# Altium schematic symbol library BeadFilter.SchLib: 54 symbols (part 3 of 3)
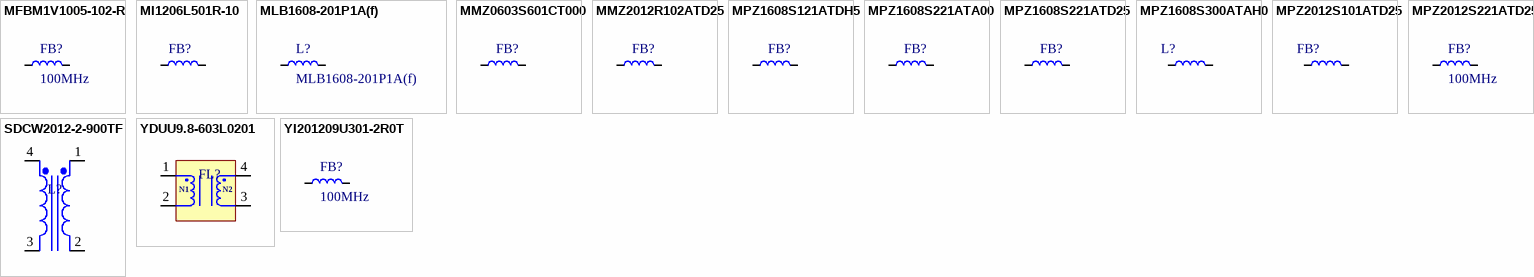
[diagram p3: symbols MFBM1V1005-102-R to YI201209U301-2R0T]

## MPZ1608S121ATDH5
designator FB?
FERRITE BEAD 120 OHM 0603 1LN; Manufacturer: TDK; Manufacturer Part Number: MPZ1608S121ATDH5; Number of Lines: 1; Max Current Rating: 2A; DC Resistance (DCR): 45mR; Impedance: 120R; Tolerance: 25%; Test Frequency: 100MHz; Supplier 1: Digi-Key; RoHS: Yes; Category: Ferrite Beads and Chips; Pricing 1: 1=0.11000, 10=0.08600, 25=0.07720, 50=0.05660, 100=0.04890, 250=0.03860, 500=0.03260, 1000=0.02746 (USD); Mount: Surface Mount; Case/Package: 0603; Case Code (Metric): 1608; Case Code (Imperial): 0603; Weight: 7.1E-05oz; Min Operating Temperature: -55°C; Max Operating Temperature: 125°C; Package Quantity: 4000; Packaging: Tape and Reel; Termination: SMD/SMT; Max DC Current: 2A; Length: 0.063inch; Width: 0.031inch; Height: 0.03inch; Ratings: AEC-Q200; RoHS Compliant: Yes; ComponentLink1URL: https://media.digikey.com/pdf/Data%20Sheets/TDK%20PDFs/MPZ_Series_Br.pdf?src-supplier=Digi-Key; ComponentLink1Description: https://media.digikey.com/pdf/Data%20Sheets/TDK%20PDFs/MPZ_Series_Br.pdf?src-supplier=Digi-Key; ComponentLink2URL: http://www.mouser.com/ds/2/400/eads_commercial_power_mpz1608_en-923650.pdf?src-supplier=Mouser; ComponentLink2Description: http://www.mouser.com/ds/2/400/eads_commercial_power_mpz1608_en-923650.pdf?src-supplier=Mouser; ComponentLink3URL: https://product.tdk.com/info/en/catalog/datasheets/beads_automotive_power_mpz1608_en.pdf?src-supplier=Digi-Key; ComponentLink3Description: https://product.tdk.com/info/en/catalog/datasheets/beads_automotive_power_mpz1608_en.pdf?src-supplier=Digi-Key; Supplier Part Number 1: 445-172891-6-ND; LCSC Part Number: C307770
footprint IND-0603 (1608 Metric) (0.063" L x 0.032" W (1.60mm x 0.80mm))
pins: 1, 2

## MPZ1608S221ATA00
designator FB?
FERRITE BEAD 220 OHM 0603 1LN; Manufacturer: TDK; Manufacturer Part Number: MPZ1608S221ATA00; Current Rating: 2.2A; Tolerance: 25%; Impedance: 220R; DC Resistance (DCR): 50mR; Test Frequency: 100MHz; Number of Lines: 1; Supplier: Avnet; Supplier Part Number: MPZ1608S221ATA00; RoHS: Yes; Category: Ferrite Beads and Chips; Stock: 4000; Pricing: 4000=0.02405, 8000=0.02275, 16000=0.02145, 24000=0.01953, 32000=0.01827 (USD); Mounting Technology: Surface Mount; Case/Package: 0603; Pins: 2; Case Code (Imperial): 0603; Core Material: Ferrite; Case Code (Metric): 1608; Packaging: Cut Tape; Package Quantity: 1; Max DC Current: 2.2A; Series: MPZ; Max Current Rating: 2.2A; RMS Current (Irms): 2.2A; ESR: 50mR; Length: 0.063inch; Width: 0.031inch; Height: 0.037inch; Lead Free: Lead Free; RoHS Compliant: Yes; Reach SVHC Compliant: No; ComponentLink1URL: https://datasheet.ciiva.com/8077/55167-8077073.pdf?src-supplier=Element14; ComponentLink1Description: https://datasheet.ciiva.com/8077/55167-8077073.pdf?src-supplier=Element14; ComponentLink2URL: https://datasheet.ciiva.com/8077/55167-8077071.pdf?src-supplier=Element14; ComponentLink2Description: https://datasheet.ciiva.com/8077/55167-8077071.pdf?src-supplier=Element14; ComponentLink3URL: https://datasheet.ciiva.com/46381/1486324-46381628.pdf?src-supplier=Element14; ComponentLink3Description: https://datasheet.ciiva.com/46381/1486324-46381628.pdf?src-supplier=Element14; ComponentLink4URL: https://datasheet.ciiva.com/46366/print-detail-pdf-phplangenpart-nompz1608s221ata00nreimp-unit-xmhz-46366044.pdf?src-supplier=Onlinecomponents.com; ComponentLink4Description: https://datasheet.ciiva.com/46366/print-detail-pdf-phplangenpart-nompz1608s221ata00nreimp-unit-xmhz-46366044.pdf?src-supplier=Onlinecomponents.com; LCSC Part Number: C76815; Item Type: Ferrite Bead
footprint IND-0603 (1608 Metric) (0.063" L x 0.032" W (1.60mm x 0.80mm))
pins: 1, 2

## MPZ1608S221ATD25
designator FB?
FERRITE BEAD 220 OHM 0603 1LN; Manufacturer: TDK; Manufacturer Part Number: MPZ1608S221ATD25; Core Material: 228ConductorMaterial; RMS Current (Irms): 2.2A; ESR: 50mR; Supplier: Mouser; Supplier Part Number: 810-MPZ1608S221ATD25; RoHS: Yes; Category: Ferrite Beads and Chips; Stock: 63812; Pricing: 1=0.1, 10=0.052, 50=0.052, 100=0.04, 1000=0.03, 10000=0.02 (USD); Lead Free: 5697LeadFree; ComponentLink1URL: http://www.mouser.com/ds/2/400/eads_commercial_power_mpz1608_en-923650.pdf?src-supplier=Mouser; ComponentLink1Description: http://www.mouser.com/ds/2/400/eads_commercial_power_mpz1608_en-923650.pdf?src-supplier=Mouser; ComponentLink2URL: https://media.digikey.com/pdf/Data%20Sheets/TDK%20PDFs/MPZ_Series_Br.pdf?src-supplier=Digikey; ComponentLink2Description: https://media.digikey.com/pdf/Data%20Sheets/TDK%20PDFs/MPZ_Series_Br.pdf?src-supplier=Digikey; ComponentLink3URL: https://product.tdk.com/info/en/catalog/datasheets/beads_automotive_power_mpz1608_en.pdf?ref_disty=digikey&src-supplier=Digikey; ComponentLink3Description: https://product.tdk.com/info/en/catalog/datasheets/beads_automotive_power_mpz1608_en.pdf?ref_disty=digikey&src-supplier=Digikey; ComponentLink4URL: https://datasheet.octopart.com/MPZ1608S221ATD25-TDK-datasheet-59262048.pdf?src-supplier=Future+Electronics; ComponentLink4Description: https://datasheet.octopart.com/MPZ1608S221ATD25-TDK-datasheet-59262048.pdf?src-supplier=Future+Electronics; Package: 0603; LCSC Part Number: C307771; Item Type: Ferrite Bead
footprint IND-0603 (1608 Metric) (0.063" L x 0.032" W (1.60mm x 0.80mm))
pins: 1, 2

## MPZ1608S300ATAH0
designator L?
FERRITE BEAD 30 OHM 0603 1LN; Manufacturer: TDK; Manufacturer Part Number: MPZ1608S300ATAH0; Impedance: 30R; Tolerance: 25%; Test Frequency: 100MHz; Max DC Current: 5A; Number of Lines: 1; ESR: 10mR; Supplier: Avnet; LCSC Part Number: C275486; RoHS: Yes; Item Type: Ferrite Bead; Stock: 16000; Pricing: 4000=0.01547 (USD); Mounting Technology: Surface Mount; Case/Package: 0603; Case Code (Metric): 1608; Case Code (Imperial): 0603; Core Material: Ferrite; Weight: 7.1E-05oz; Min Operating Temperature: -55°C; Max Operating Temperature: 125°C; Packaging: Tape and Reel; Termination: SMD/SMT; Package Quantity: 4000; Series: MPZ; Max Current Rating: 5A; RMS Current (Irms): 5A; Length: 1.6mm; Width: 0.8mm; Height: 0.6mm; Depth: 0.8mm; RoHS Compliant: Yes; Reach SVHC Compliant: No; Lead Free: Lead Free; ComponentLink1URL: https://datasheet.ciiva.com/46381/1795297-46381672.pdf?src-supplier=Element14; ComponentLink1Description: https://datasheet.ciiva.com/46381/1795297-46381672.pdf?src-supplier=Element14; ComponentLink2URL: https://datasheet.ciiva.com/46634/beads-commercial-power-mpz-en-46634469.pdf?src-supplier=Digikey; ComponentLink2Description: https://datasheet.ciiva.com/46634/beads-commercial-power-mpz-en-46634469.pdf?src-supplier=Digikey; ComponentLink3URL: https://datasheet.ciiva.com/46634/beads-commercial-power-mpz-en-46634463.pdf?src-supplier=Digikey; ComponentLink3Description: https://datasheet.ciiva.com/46634/beads-commercial-power-mpz-en-46634463.pdf?src-supplier=Digikey
footprint IND-0603 (1608 Metric) (0.063" L x 0.032" W (1.60mm x 0.80mm))
pins: 1, 2

## MPZ2012S101ATD25
designator FB?
FERRITE BEAD 100 OHM 0805 1LN; Manufacturer: TDK; Manufacturer Part Number: MPZ2012S101ATD25; Manufacturer Lifecycle Status: PRODUCTION; Item Type: Ferrite Beads and Chips; Current Rating: 4A; DC Resistance (DCR): 20mΩ; Impedance: 100Ω; Number of Circuits: 1; Value: 20mΩ; Test Frequency: 100MHz; Tolerance: 25%; Supplier: Arrow Electronics; Supplier Part Number: MPZ2012S101ATD25; RoHS: Compliant; Stock: 4000; Pricing: 2732=0.0272 (USD); Case/Package: 0805; Case Code (Imperial): 0805; Case Code (Metric): 2012; China RoHS: Compliant; Core Material: Ferrite; Depth: 1.25mm; Height: 850µm; Lead Free: Lead Free; Length: 2mm; Lifecycle Status: Production; Max Current Rating: 4A; Max DC Current: 4A; Max Length: 2.2mm; Max Operating Temperature: 125°C; Max Width: 1.45mm; Min Length: 1.8mm; Min Operating Temperature: -55°C; Min Width: 1.05mm; Mounting Technology: Surface Mount; Number of Lines: 1; Number of Terminals: 2; Packaging: Cut Tape (CT); Ratings: AEC-Q200; REACH SVHC: Yes; Schedule B: 8504500000, 8504500000|8504500000|8504500000|8504500000|8504500000; Termination: SMD/SMT; Weight: 5.499807mg; Width: 1.25mm; ComponentLink1URL: https://datasheet.octopart.com:443/MPZ2012S101ATD25-TDK-datasheet-181268484.pdf?src-supplier=IHS; ComponentLink1Description: https://datasheet.octopart.com:443/MPZ2012S101ATD25-TDK-datasheet-181268484.pdf?src-supplier=IHS; ComponentLink2URL: https://datasheet.octopart.com:443/MPZ2012S101ATD25-TDK-datasheet-155380321.pdf?src-supplier=TDK; ComponentLink2Description: https://datasheet.octopart.com:443/MPZ2012S101ATD25-TDK-datasheet-155380321.pdf?src-supplier=TDK; ComponentLink3URL: https://datasheet.octopart.com:443/MPZ2012S101ATD25-TDK-datasheet-166558464.pdf?src-supplier=TME; ComponentLink3Description: https://datasheet.octopart.com:443/MPZ2012S101ATD25-TDK-datasheet-166558464.pdf?src-supplier=TME; ComponentLink4URL: https://datasheet.octopart.com:443/MPZ2012S101ATD25-TDK-datasheet-56871343.pdf?src-supplier=Future+Electronics; ComponentLink4Description: https://datasheet.octopart.com:443/MPZ2012S101ATD25-TDK-datasheet-56871343.pdf?src-supplier=Future+Electronics; ComponentLink5URL: https://datasheet.octopart.com:443/MPZ2012S101ATD25-TDK-datasheet-39118740.pdf?src-supplier=Future+Electronics; ComponentLink5Description: https://datasheet.octopart.com:443/MPZ2012S101ATD25-TDK-datasheet-39118740.pdf?src-supplier=Future+Electronics; ComponentLink6URL: https://datasheet.octopart.com:443/MPZ2012S101ATD25-TDK-datasheet-12512619.pdf?src-supplier=Future+Electronics; ComponentLink6Description: https://datasheet.octopart.com:443/MPZ2012S101ATD25-TDK-datasheet-12512619.pdf?src-supplier=Future+Electronics; ComponentLink7URL: https://datasheet.octopart.com:443/MPZ2012S101ATD25-TDK-datasheet-8365394.pdf?src-supplier=Future+Electronics; ComponentLink7Description: https://datasheet.octopart.com:443/MPZ2012S101ATD25-TDK-datasheet-8365394.pdf?src-supplier=Future+Electronics; ComponentLink8URL: https://datasheet.octopart.com:443/MPZ2012S101ATD25-TDK-datasheet-7554990.pdf?src-supplier=Future+Electronics; ComponentLink8Description: https://datasheet.octopart.com:443/MPZ2012S101ATD25-TDK-datasheet-7554990.pdf?src-supplier=Future+Electronics
footprint Ind-0805 (Inductor 0805)
pins: 1, 2

## MPZ2012S221ATD25
designator FB?, comment 100MHz
FERRITE BEAD 220 OHM 0805 1LN; Manufacturer: TDK; Manufacturer Part Number: MPZ2012S221ATD25; Core Material: 228ConductorMaterial; Number of Lines: 1; Max Current Rating: 3A; Impedance: 220R; Tolerance: 25%; ESR: 40mR; Supplier: Avnet; Supplier Part Number: 45AC5565; RoHS: Yes; Category: Ferrite Beads and Chips; Stock: 4000; Pricing: 4000=0.03, 8000=0.029 (USD); Mounting Technology: Surface Mount; Case/Package: 0805; Case Code (Metric): 2012; Case Code (Imperial): 0805; Weight: 0.000194oz; Min Operating Temperature: -55°C; Max Operating Temperature: 125°C; Package Quantity: 4000; Packaging: Tape and Reel; Termination: SMD/SMT; Max DC Current: 3A; Test Frequency: 100MHz; Series: MPZ; RMS Current (Irms): 3A; Length: 2mm; Width: 1.25mm; Height: 0.85mm; Ratings: AEC-Q200; RoHS Compliant: Yes; Lead Free: 5697LeadFree; ComponentLink1URL: http://www.mouser.com/ds/2/400/eads_commercial_power_mpz2012_en-923646.pdf?src-supplier=Mouser; ComponentLink1Description: http://www.mouser.com/ds/2/400/eads_commercial_power_mpz2012_en-923646.pdf?src-supplier=Mouser; ComponentLink2URL: https://media.digikey.com/pdf/Data%20Sheets/TDK%20PDFs/MPZ_Series_Br.pdf?src-supplier=Digi-Key; ComponentLink2Description: https://media.digikey.com/pdf/Data%20Sheets/TDK%20PDFs/MPZ_Series_Br.pdf?src-supplier=Digi-Key; ComponentLink3URL: http://www.farnell.com/datasheets/2724091.pdf?src-supplier=Farnell; ComponentLink3Description: http://www.farnell.com/datasheets/2724091.pdf?src-supplier=Farnell; ComponentLink4URL: https://product.tdk.com/info/en/catalog/datasheets/beads_automotive_power_mpz2012_en.pdf?ref_disty=digikey&src-supplier=Digi-Key; ComponentLink4Description: https://product.tdk.com/info/en/catalog/datasheets/beads_automotive_power_mpz2012_en.pdf?ref_disty=digikey&src-supplier=Digi-Key; ComponentLink5URL: http://www.farnell.com/datasheets/2724091.pdf?src-supplier=Element14; ComponentLink5Description: http://www.farnell.com/datasheets/2724091.pdf?src-supplier=Element14; ComponentLink6URL: https://datasheet.octopart.com/MPZ2012S221ATD25-TDK-datasheet-99917311.pdf?src-supplier=Newark; ComponentLink6Description: https://datasheet.octopart.com/MPZ2012S221ATD25-TDK-datasheet-99917311.pdf?src-supplier=Newark; ComponentLink7URL: https://datasheet.octopart.com/MPZ2012S221ATD25-TDK-datasheet-166558464.pdf?src-supplier=TME; ComponentLink7Description: https://datasheet.octopart.com/MPZ2012S221ATD25-TDK-datasheet-166558464.pdf?src-supplier=TME; LCSC Part Number: C307778; Item Type: Ferrite Bead
footprint Ind-0805 (Inductor 0805)
pins: 1, 2

## SDCW2012-2-900TF
designator L?
90Ω@100MHz -40℃~+85℃ 350mΩ 50V 2 330mA 125V 0805 Common Mode Filters ROHS; Manufacturer: Sunlord; Manufacturer Part Number: SDCW2012-2-900TF; Supplier 1: Digi-Key; RoHS: No; Category: Common Mode Chokes; Supplier Part Number 1: 3442-SDCW2012-2-900TFCT-ND; ComponentLink1Description: LCSC; ComponentLink1URL: https://www.lcsc.com/product-detail/Common-Mode-Filters_Sunlord-SDCW2012-2-900TF_C54888.html; LCSC Part Number: C54888
footprint SDCW2012-2-900TF_
pins: 1, 2, 3, 4

## YDUU9.8-603L0201
designator FL?
Plugin Common Mode Filters ROHS; Manufacturer: YJYCOIN; Manufacturer Part Number: YDUU9.8-603L0201; Package: Plugin; LCSC Part Number: C4945104; Item Type: Mode Filter; ComponentLink1Description: LCSC; ComponentLink1URL: https://www.lcsc.com/product-detail/Common-Mode-Filters_YJYCOIN-YDUU9-8-603L0201_C4945104.html
footprint YDUU9.8-603L0201
pins: 1, 2, 3, 4
text: N1; N2

## YI201209U301-2R0T
designator FB?, comment 100MHz
100mΩ ±25% 300Ω@100MHz 0805 Ferrite Beads ROHS; Manufacturer: YJYCOIN; Manufacturer Part Number: YI201209U301-2R0T; Package: 0805; LCSC Part Number: C2858467; Item Type: Ferrite Bead; ComponentLink1Description: LCSC; ComponentLink1URL: https://www.lcsc.com/product-detail/span-style-background-color-ff0-Ferrite-span-Beads_YJYCOIN-YI201209U301-2R0T_C2858467.html
footprint Ind-0805 (Inductor 0805)
pins: 1, 2